# Altium footprint library Regulator$.PcbLib: 106 footprints (part 1 of 7)
Each footprint in its own frame and in the unit in brackets; x right, y up, seen from the top. Pads: shape width x height; smd on the part's side, far side on the other; paste and mask are expansions set on the pad; w line width, h text height; cw(c..) or ccw(c..) is an arc to the next point about the centre after c.
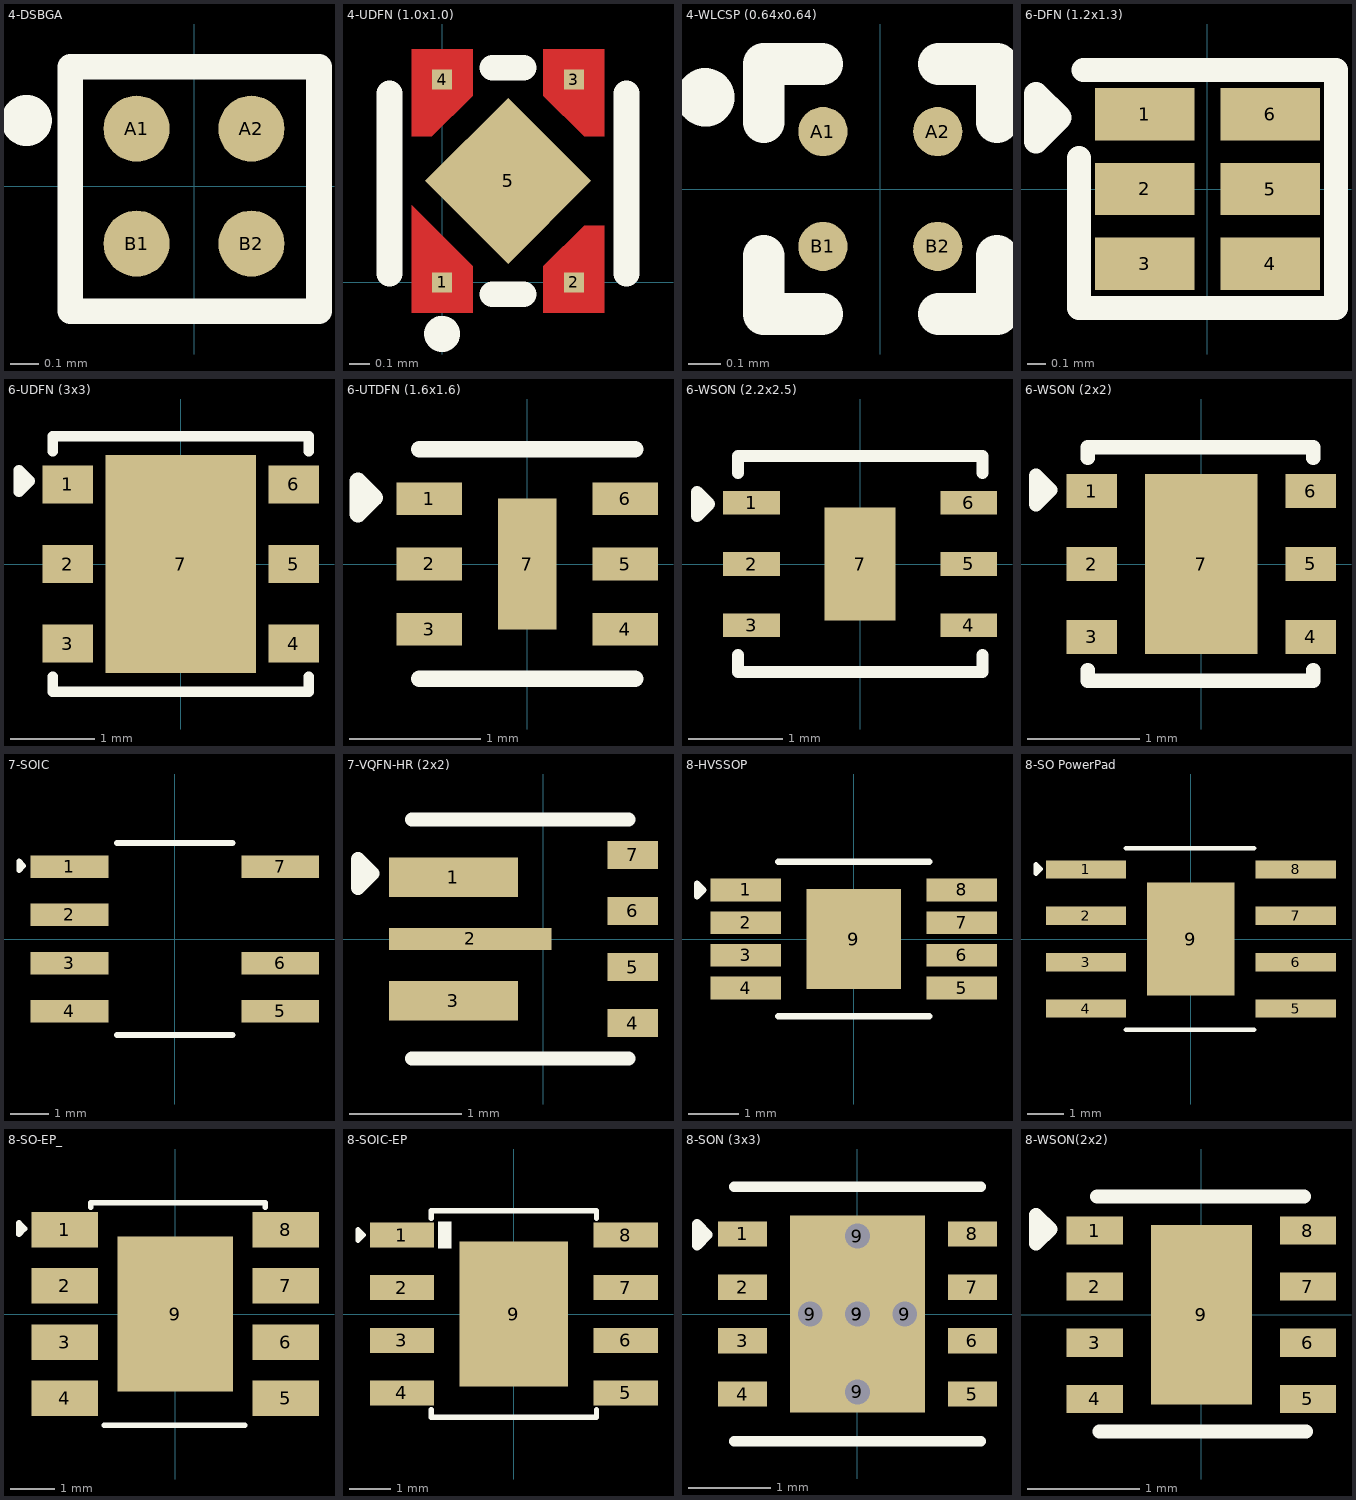
[diagram p0: the footprints below, top view; thin cyan lines are the x and y axes]

## 4-DSBGA [mm]
pads (4):
  round 0.23 smd mask+0.05: A1(-0.2,0.2) A2(0.2,0.2) B1(-0.2,-0.2) B2(0.2,-0.2)
Top Overlay:
  circle w0.127: c-0.584,0.229 r0.025
  lines w0.089: -0.432,-0.435 -0.432,0.415 0.435,0.415 0.435,-0.435 -0.432,-0.435
3D body "TLV70536YFPR.step": height 0.5, standoff 0, extent -0.39,-0.39 0.39,0.39

## 4-UDFN (1.0x1.0) [mm]
pads (5):
  rect 0.1x0.1 smd paste-1 mask+0: 1(0,0) 2(0.65,0) 3(0.65,1) 4(0,1)
  rect 0.58x0.58 smd rot 45: 5(0.325,0.5)
Top Layer:
  region: 0.15,0.92 -0.05,0.72 -0.15,0.72 -0.15,1.15 0.15,1.15
  region: 0.8,0.72 0.7,0.72 0.5,0.92 0.5,1.15 0.8,1.15
  region: 0.8,-0.15 0.5,-0.15 0.5,0.08 0.7,0.28 0.8,0.28
  region: 0.15,0.08 0.15,-0.15 -0.15,-0.15 -0.15,0.38
Top Overlay:
  circle w0.127: c0,-0.254 r0.025
  lines w0.127: -0.259,0.043 -0.259,0.932 ; 0.249,-0.059 0.401,-0.059 ; 0.249,1.059 0.401,1.059 ; 0.909,0.043 0.909,0.932
Top Paste:
  region: 0.15,0.92 -0.05,0.72 -0.15,0.72 -0.15,1.15 0.15,1.15
  region: 0.8,0.72 0.7,0.72 0.5,0.92 0.5,1.15 0.8,1.15
  region: 0.8,-0.15 0.5,-0.15 0.5,0.08 0.7,0.28 0.8,0.28
  region: 0.15,0.08 0.15,-0.15 -0.15,-0.15 -0.15,0.38
Top Solder:
  region: 0.675,0.119 -0.056,0.119 -0.056,0.85 0.675,0.85
  region: 0.2,0.9 -0.025,0.675 -0.2,0.675 -0.2,1.2 0.2,1.2
  region: 0.85,-0.2 0.45,-0.2 0.45,0.1 0.675,0.325 0.85,0.325
  region: 0.85,0.675 0.675,0.675 0.45,0.9 0.45,1.2 0.85,1.2
  region: 0.2,0.1 0.2,-0.2 -0.2,-0.2 -0.2,0.45 -0.15,0.45
3D body "step_temp.STEP": height 0.58, standoff -0.03, extent -0.175,0 0.825,1

## 4-WLCSP (0.64x0.64) [mm]
pads (4):
  round 0.15 smd mask+0.055: A1(-0.175,0.175) A2(0.175,0.175) B1(-0.175,-0.175) B2(0.175,-0.175)
Top Overlay:
  circle w0.127: c-0.533,0.279 r0.025
  lines w0.127: -0.356,-0.203 -0.356,-0.381 -0.178,-0.381 ; -0.356,0.203 -0.356,0.381 -0.178,0.381 ; 0.178,-0.381 0.356,-0.381 0.356,-0.203 ; 0.178,0.381 0.356,0.381 0.356,0.203
3D body "NCP161BFCT180T2G.STEP": height 0.31, standoff -0.02, extent -0.32,-0.32 0.32,0.32

## 6-DFN (1.2x1.3) [mm]
pads (6):
  rect 0.53x0.28 smd mask+0.055: 1(-0.335,0.4) 2(-0.335,0) 3(-0.335,-0.4) 4(0.335,-0.4) 5(0.335,0) 6(0.335,0.4)
Top Overlay:
  lines w0.127: -0.686,0.165 -0.686,-0.635 0.686,-0.635 0.686,0.635 -0.66,0.635 ; -0.914,0.254 -0.787,0.381 -0.914,0.508 -0.914,0.254
3D body "LDK120PU33R.STEP": height 0.55, standoff 0, extent -0.654,-0.6 0.646,0.6

## 6-UDFN (3x3) [mm]
pads (7):
  rect 0.6x0.45 smd mask+0.102: 1(-1.35,0.95) 2(-1.35,0) 3(-1.35,-0.95) 4(1.35,-0.95) 5(1.35,0) 6(1.35,0.95)
  rect 1.8x2.6 smd mask+0.102: 7(0,0)
Top Overlay:
  lines w0.127: -1.528,-1.346 -1.528,-1.524 1.528,-1.524 1.528,-1.346 ; -1.528,1.346 -1.528,1.524 1.528,1.524 1.528,1.346 ; -1.93,0.864 -1.93,1.118 -1.803,0.991 -1.93,0.864
3D body "UDFN6_3X3_ONS.step": height 0.56, standoff 0, extent -1.499,-1.499 1.499,1.499

## 6-UTDFN (1.6x1.6) [mm]
pads (7):
  rect 0.5x0.25 smd mask+0.102: 1(-0.75,0.5) 2(-0.75,0) 3(-0.75,-0.5) 4(0.75,-0.5) 5(0.75,0) 6(0.75,0.5)
  rect 0.45x1 smd mask+0.102: 7(0,0)
Top Overlay:
  lines w0.127: -0.826,-0.877 0.826,-0.877 ; -0.826,0.877 0.826,0.877 ; -1.295,0.381 -1.295,0.635 -1.168,0.508 -1.295,0.381

## 6-WSON (2.2x2.5) [mm]
pads (7):
  rect 0.6x0.25 smd: 1(-1.15,0.65) 2(-1.15,0) 3(-1.15,-0.65) 4(1.15,-0.65) 5(1.15,0) 6(1.15,0.65)
  rect 0.75x1.2 smd: 7(0,0)
Top Overlay:
  lines w0.127: -1.295,-0.965 -1.295,-1.143 1.295,-1.143 1.295,-0.965 ; -1.295,0.965 -1.295,1.143 1.295,1.143 1.295,0.965 ; -1.727,0.508 -1.6,0.635 -1.727,0.762 -1.727,0.508
3D body "NOPB.STEP": height 0.8, standoff 0, extent -1.25,-1.1 1.25,1.1

## 6-WSON (2x2) [mm] "TPS60150DRVR"
pads (7):
  rect 0.45x0.3 smd: 1(-0.975,0.65) 2(-0.975,0) 3(-0.975,-0.65) 4(0.975,-0.65) 5(0.975,0) 6(0.975,0.65)
  rect 1x1.6 smd: 7(0,0)
Top Overlay:
  lines w0.127: -1.011,-0.945 -1.011,-1.041 -0.406,-1.041 0.394,-1.041 0.998,-1.041 0.998,-0.945 ; -1.011,0.945 -1.011,1.041 -0.406,1.041 0.394,1.041 0.998,1.041 0.998,0.945 ; -1.473,0.533 -1.346,0.66 -1.473,0.787 -1.473,0.533
3D body "DRV0006A.stp": height 0.78, standoff -0.02, extent -1,-1 1,1

## 7-SOIC [mm]
pads (7):
  rect 2.045x0.588 smd: 1(-2.772,1.905) 2(-2.772,0.635) 3(-2.772,-0.635) 4(-2.772,-1.905) 5(2.772,-1.905) 6(2.772,-0.635) 7(2.772,1.905)
Top Overlay:
  lines w0.127: -4.099,1.798 -3.972,1.925 -4.099,2.052 -4.099,1.798
  lines w0.152: -1.521,-2.526 1.521,-2.526 ; -1.521,2.526 1.521,2.526
3D body "UCC28740DR.STEP": height 1.75, standoff 0, extent -2.997,-2.451 2.997,2.451

## 7-VQFN-HR (2x2) [mm]
pads (7):
  rect 1.15x0.35 smd: 1(-0.8,0.55) 3(-0.8,-0.55)
  rect 1.45x0.2 smd: 2(-0.65,0)
  rect 0.45x0.25 smd: 4(0.8,-0.75) 5(0.8,-0.25) 6(0.8,0.25) 7(0.8,0.75)
Top Overlay:
  lines w0.127: -1.168,-1.067 0.762,-1.067 ; -1.168,1.067 0.762,1.067 ; -1.651,0.457 -1.651,0.711 -1.524,0.584 -1.651,0.457
3D body "TPS61022RWUR--3DModel-STEP-56544.STEP": height 1, standoff 0, extent -1.178,-1 0.822,1

## 8-HVSSOP [mm]
pads (9):
  rect 1.4x0.45 smd mask+0.05: 1(-2.15,0.975) 2(-2.15,0.325) 3(-2.15,-0.325) 4(-2.15,-0.975) 5(2.15,-0.975) 6(2.15,-0.325) 7(2.15,0.325) 8(2.15,0.975)
  rect 1.88x1.98 smd paste-2 mask+0.05: 9(0,0)
Top Overlay:
  lines w0.127: -1.5,-1.535 1.5,-1.535 ; -1.5,1.535 1.5,1.535 ; -3.117,0.848 -2.99,0.975 -3.117,1.102 -3.117,0.848
3D body "step_temp.STEP": height 1.1, standoff 0, extent -2.45,-1.5 2.45,1.5

## 8-SO PowerPad [mm]
pads (9):
  rect 2.2x0.5 smd mask+0.07: 1(-2.875,1.905) 2(-2.875,0.635) 3(-2.875,-0.635) 4(-2.875,-1.905) 5(2.875,-1.905) 6(2.875,-0.635) 7(2.875,0.635) 8(2.875,1.905)
  rect 2.4x3.1 smd mask+0.07: 9(0,0)
Top Overlay:
  lines w0.127: -1.778,-2.489 1.727,-2.489 ; -1.778,2.489 1.727,2.489 ; -4.243,1.791 -4.243,2.045 -4.116,1.918 -4.243,1.791
3D body "AP64501SP-13.STEP": height 1.7, standoff 0, extent -3,-2.45 3,2.45

## 8-SO-EP_ [mm]
pads (9):
  rect 1.505x0.802 smd: 1(-2.497,1.905) 2(-2.497,0.635) 3(-2.497,-0.635) 4(-2.497,-1.905) 5(2.498,-1.905) 6(2.498,-0.635) 7(2.498,0.635) 8(2.498,1.905)
  rect 2.613x3.502 smd: 9(0,0)
Top Overlay:
  lines w0.127: -1.905,2.413 -1.905,2.515 2.032,2.515 2.032,2.413 ; -1.6,-2.515 1.575,-2.515 ; -3.531,1.803 -3.404,1.93 -3.531,2.057 -3.531,1.803
3D body "AP64501SP-13.STEP": height 1.7, standoff 0, extent -3,-2.45 3,2.45

## 8-SOIC-EP [mm]
pads (9):
  rect 1.55x0.6 smd: 1(-2.7,1.905) 2(-2.7,0.635) 3(-2.7,-0.635) 4(-2.7,-1.905) 5(2.7,-1.905) 6(2.7,-0.635) 7(2.7,0.635) 8(2.7,1.905)
  rect 2.613x3.502 smd: 9(0,0)
Top Overlay:
  rectangle: -1.829,1.575 -1.499,2.235
  lines w0.127: -1.991,-2.311 -1.991,-2.489 1.991,-2.489 1.991,-2.311 ; -1.991,2.311 -1.991,2.489 1.991,2.489 1.991,2.311 ; -3.759,1.778 -3.632,1.905 -3.759,2.032 -3.759,1.778
3D body "User Library-SOIC-8-1.STEP": height 1.7, standoff -0.05, extent -3,-2.45 3,2.45

## 8-SON (3x3) [mm]
pads (14):
  rect 0.6x0.31 smd paste+0 mask+0.07: 1(-1.4,0.975) 2(-1.4,0.325) 3(-1.4,-0.325) 4(-1.4,-0.975) 5(1.4,-0.975) 6(1.4,-0.325) 7(1.4,0.325) 8(1.4,0.975)
  round 0.5 hole 0.3 paste-2539.97 mask+0: 9(-0.575,0) 9(0,-0.95) 9(0,0) 9(0,0.95) 9(0.575,0)
  rect 1.65x2.4 smd paste+0 mask+0.07: 9(0,0)
Top Overlay:
  lines w0.127: -1.5,-1.551 1.5,-1.551 ; -1.5,1.551 1.5,1.551 ; -1.956,0.838 -1.829,0.965 -1.956,1.092 -1.956,0.838
3D body "TLV76733QWDRBRQ1.STEP": height 1, standoff 0, extent -1.5,-1.5 1.5,1.5

## 8-WSON(2x2) [mm] "IC REG BUCK 3.3V 1A 8WSON"
pads (9):
  rect 0.5x0.25 smd: 1(-0.95,0.75) 2(-0.95,0.25) 3(-0.95,-0.25) 4(-0.95,-0.75) 5(0.95,-0.75) 6(0.95,-0.25) 7(0.95,0.25) 8(0.95,0.75)
  rect 0.9x1.6 smd: 9(0,0)
Top Overlay:
  lines w0.127: -0.927,1.054 0.914,1.054 ; -0.908,-1.041 0.933,-1.041 ; -1.473,0.635 -1.346,0.762 -1.473,0.889 -1.473,0.635
3D body "TPS62162DSGR.STEP": height 0.8, standoff 0, extent -1,-1 1,1